# Altium footprint library sarmixer.PcbLib: 15 footprints
Each footprint in its own frame and in the unit in brackets; x right, y up, seen from the top. Pads: shape width x height; smd on the part's side, far side on the other; paste and mask are expansions set on the pad; w line width, h text height; cw(c..) or ccw(c..) is an arc to the next point about the centre after c.
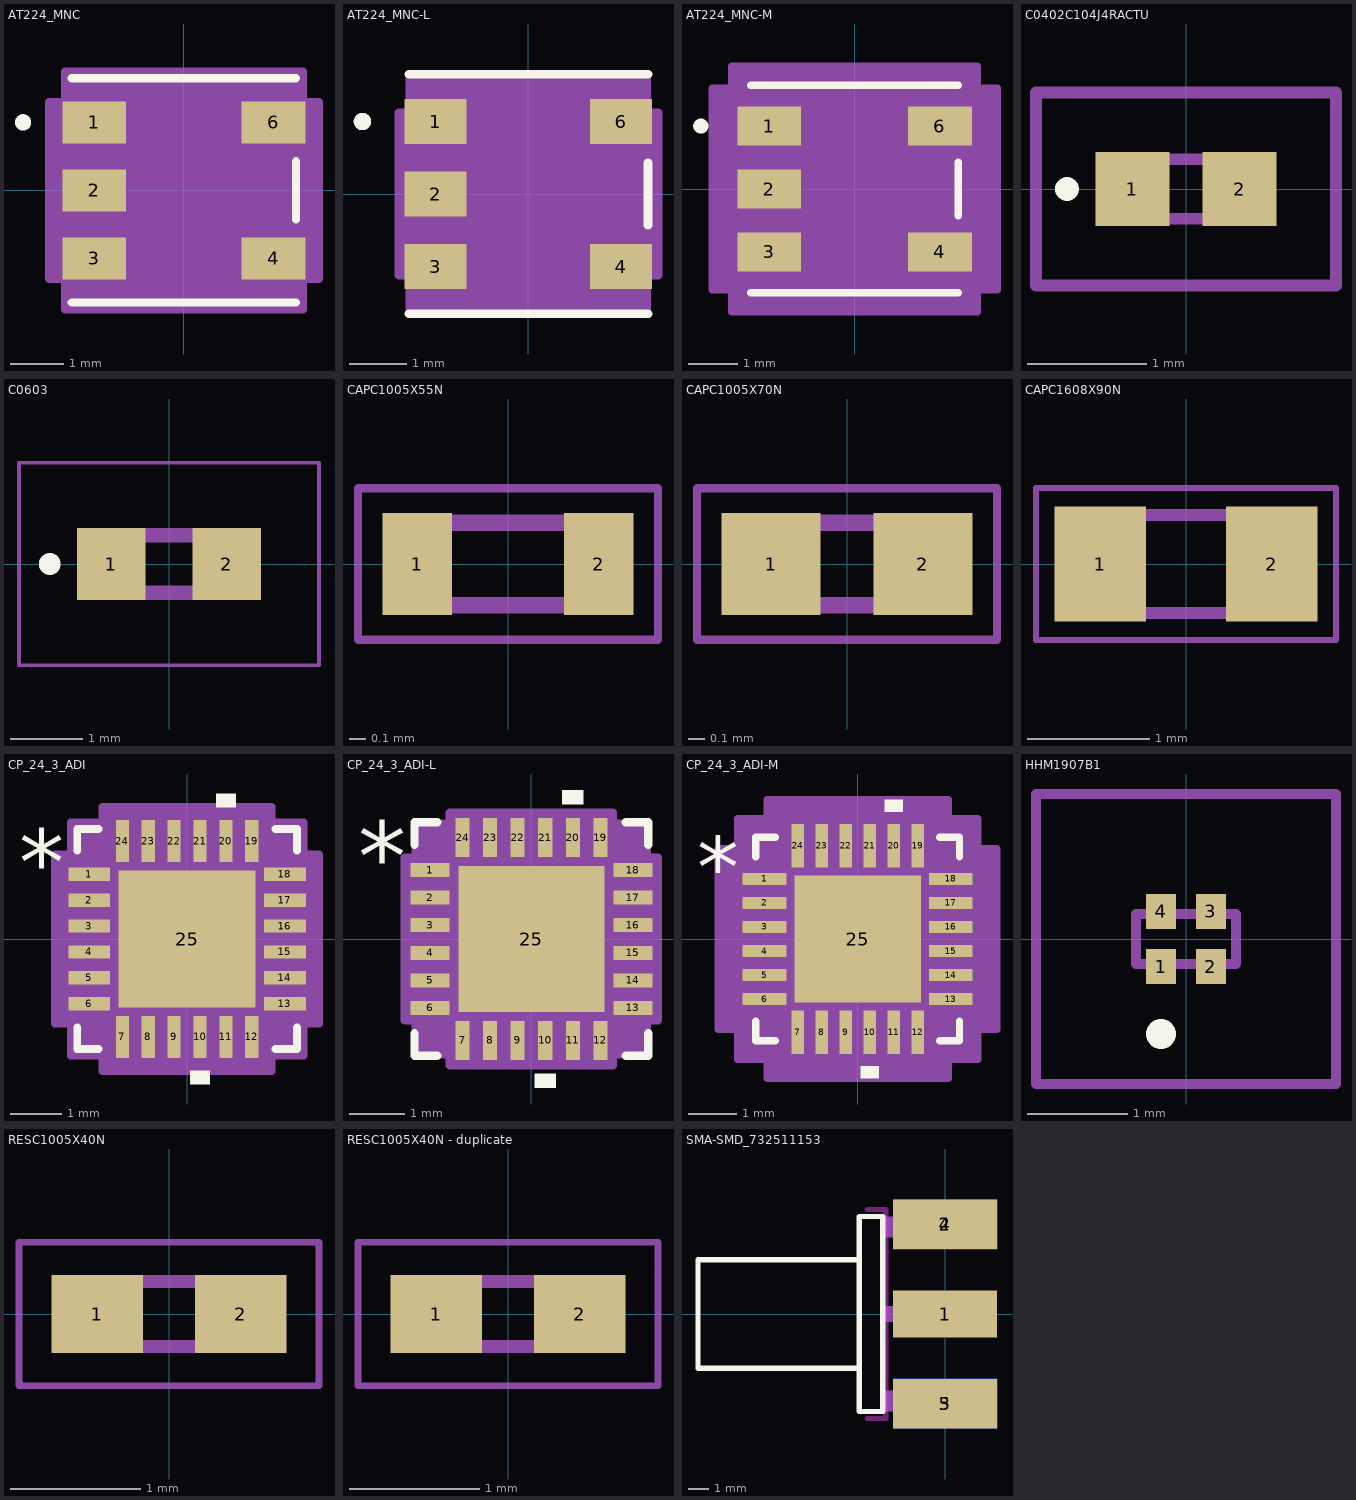
[diagram p0: the footprints below, top view; thin cyan lines are the x and y axes]

## AT224_MNC [mm]
pads (5):
  rect 1.189x0.788 smd paste+0 mask+0: 1(-1.674,1.27) 2(-1.674,0) 3(-1.674,-1.27) 4(1.674,-1.27) 6(1.674,1.27)
Top Overlay:
  circle w0.152: c-3.005,1.27 r0.076
  lines w0.152: -2.095,-2.095 2.095,-2.095 ; -2.095,2.095 2.095,2.095 ; 2.095,-0.543 2.095,0.543
  text ".Designator" at -3.492,-0.635 h1.27
Mechanical 13:
  circle w0.025: c-1.079,1.27 r0.076
  lines w0.025: -0.305,1.968 ccw(c0,1.968) 0.305,1.968 ; -1.968,-1.968 1.968,-1.968 1.968,1.968 -1.968,1.968 -1.968,-1.968
  text ".Designator" at -3.492,-0.635 h1.27
Mechanical 15:
  region: 2.222,-2.222 -2.222,-2.222 -2.222,-1.651 -2.522,-1.651 -2.522,1.651 -2.222,1.651 -2.222,2.222 2.222,2.222 2.222,1.651 2.522,1.651 2.522,-1.651 2.222,-1.651
  lines w0.152: -2.522,-1.651 -2.222,-1.651 -2.222,-2.222 2.222,-2.222 2.222,-1.651 2.522,-1.651 2.522,1.651 2.222,1.651 2.222,2.222 -2.222,2.222 -2.222,1.651 -2.522,1.651 -2.522,-1.651
3D body "AT224_MNC.step": height 3.81, standoff 0, extent -1.968,-1.968 1.968,1.968

## AT224_MNC-L [mm]
pads (5):
  rect 1.089x0.788 smd paste+0 mask+0: 1(-1.624,1.27) 2(-1.624,0) 3(-1.624,-1.27) 4(1.624,-1.27) 6(1.624,1.27)
Top Overlay:
  circle w0.152: c-2.905,1.27 r0.076
  lines w0.152: -2.095,-2.095 2.095,-2.095 ; -2.095,2.095 2.095,2.095 ; 2.095,-0.543 2.095,0.543
  text ".Designator" at -3.492,-0.635 h1.27
Mechanical 13:
  circle w0.025: c-1.079,1.27 r0.076
  lines w0.025: -0.305,1.968 ccw(c0,1.968) 0.305,1.968 ; -1.968,-1.968 1.968,-1.968 1.968,1.968 -1.968,1.968 -1.968,-1.968
  text ".Designator" at -3.492,-0.635 h1.27
Mechanical 15:
  region: 2.07,-2.07 -2.07,-2.07 -2.07,-1.422 -2.27,-1.422 -2.27,1.422 -2.07,1.422 -2.07,2.07 2.07,2.07 2.07,1.422 2.27,1.422 2.27,-1.422 2.07,-1.422
  lines w0.152: -2.27,-1.422 -2.07,-1.422 -2.07,-2.07 2.07,-2.07 2.07,-1.422 2.27,-1.422 2.27,1.422 2.07,1.422 2.07,2.07 -2.07,2.07 -2.07,1.422 -2.27,1.422 -2.27,-1.422
3D body "AT224_MNC.step": height 3.81, standoff 0, extent -1.968,-1.968 1.968,1.968

## AT224_MNC-M [mm]
pads (5):
  rect 1.289x0.788 smd paste+0 mask+0: 1(-1.724,1.27) 2(-1.724,0) 3(-1.724,-1.27) 4(1.724,-1.27) 6(1.724,1.27)
Top Overlay:
  circle w0.152: c-3.105,1.27 r0.076
  lines w0.152: -2.095,-2.095 2.095,-2.095 ; -2.095,2.095 2.095,2.095 ; 2.095,-0.543 2.095,0.543
  text ".Designator" at -3.492,-0.635 h1.27
Mechanical 13:
  circle w0.025: c-1.079,1.27 r0.076
  lines w0.025: -0.305,1.968 ccw(c0,1.968) 0.305,1.968 ; -1.968,-1.968 -1.968,1.968 1.968,1.968 1.968,-1.968 -1.968,-1.968
  text ".Designator" at -3.492,-0.635 h1.27
Mechanical 15:
  region: 2.476,-2.476 -2.476,-2.476 -2.476,-2.032 -2.876,-2.032 -2.876,2.032 -2.476,2.032 -2.476,2.476 2.476,2.476 2.476,2.032 2.876,2.032 2.876,-2.032 2.476,-2.032
  lines w0.152: -2.876,-2.032 -2.876,2.032 -2.476,2.032 -2.476,2.476 2.476,2.476 2.476,2.032 2.876,2.032 2.876,-2.032 2.476,-2.032 2.476,-2.476 -2.476,-2.476 -2.476,-2.032 -2.876,-2.032
3D body "AT224_MNC.step": height 3.81, standoff 0, extent -1.968,-1.968 1.968,1.968

## C0402C104J4RACTU [mm]
pads (2):
  rect 0.62x0.62 smd: 1(-0.45,0) 2(0.45,0)
Top Overlay:
  lines w0.1: -1,-0.05 ccw(c-1,0) -1,0.05 ccw(c-1,0) -1,-0.05
Mechanical 13:
  lines w0.1: -0.5,-0.25 -0.5,0.25 0.5,0.25 0.5,-0.25 -0.5,-0.25
Mechanical 15:
  lines w0.1: -1.26,-0.81 -1.26,0.81 1.26,0.81 1.26,-0.81 -1.26,-0.81
3D body "C0402C104K4RACTU.stp": height 0.55, standoff 0, extent -0.52,-0.28 0.53,0.27

## C0603 [mm]
pads (2):
  rect 0.95x1 smd: 1(-0.8,0) 2(0.8,0)
Top Overlay:
  circle w0.2: c-1.65,0 r0.05
Mechanical 13:
  lines w0.2: -0.8,-0.4 0.8,-0.4 0.8,0.4 -0.8,0.4 -0.8,-0.4
Mechanical 15:
  lines w0.05: -2.075,-1.4 2.075,-1.4 2.075,1.4 -2.075,1.4 -2.075,-1.4
3D body "C0603C104K4RACAUTO.stp": height 0.87, standoff 0, extent -0.87,-0.48 0.88,0.47

## CAPC1005X55N [mm]
pads (2):
  rect 0.42x0.62 smd: 1(-0.55,0) 2(0.55,0)
Mechanical 13:
  lines w0.1: -0.5,-0.25 0.5,-0.25 0.5,0.25 -0.5,0.25 -0.5,-0.25
Mechanical 15:
  lines w0.05: -0.91,-0.46 0.91,-0.46 0.91,0.46 -0.91,0.46 -0.91,-0.46
3D body "CGA2B2X8R2A222K050BA.stp": height 0.55, standoff 0, extent -0.5,-0.25 0.5,0.25

## CAPC1005X70N [mm]
pads (2):
  rect 0.6x0.62 smd: 1(-0.46,0) 2(0.46,0)
Mechanical 13:
  lines w0.1: -0.5,-0.25 0.5,-0.25 0.5,0.25 -0.5,0.25 -0.5,-0.25
Mechanical 15:
  lines w0.05: -0.91,-0.46 0.91,-0.46 0.91,0.46 -0.91,0.46 -0.91,-0.46
3D body "GRM1555C1H102JA01J.stp": height 0.5, standoff 0, extent -0.5,-0.25 0.5,0.25

## CAPC1608X90N [mm]
pads (2):
  rect 0.75x0.94 smd: 1(-0.7,0) 2(0.7,0)
Mechanical 13:
  lines w0.1: -0.8,-0.4 0.8,-0.4 0.8,0.4 -0.8,0.4 -0.8,-0.4
Mechanical 15:
  lines w0.05: -1.225,-0.62 1.225,-0.62 1.225,0.62 -1.225,0.62 -1.225,-0.62
3D body "GRM188D71A225KE34J.stp": height 0.8, standoff 0, extent -0.8,-0.45 0.8,0.45

## CP_24_3_ADI [mm]
pads (25):
  rect 0.808x0.255 smd paste+0 mask+0: 1(-1.89,1.25) 2(-1.89,0.75) 3(-1.89,0.25) 4(-1.89,-0.25) 5(-1.89,-0.75) 6(-1.89,-1.25) 13(1.89,-1.25) 14(1.89,-0.75) 15(1.89,-0.25) 16(1.89,0.25) 17(1.89,0.75) 18(1.89,1.25)
  rect 0.255x0.808 smd paste+0 mask+0: 7(-1.25,-1.89) 8(-0.75,-1.89) 9(-0.25,-1.89) 10(0.25,-1.89) 11(0.75,-1.89) 12(1.25,-1.89) 19(1.25,1.89) 20(0.75,1.89) 21(0.25,1.89) 22(-0.25,1.89) 23(-0.75,1.89) 24(-1.25,1.89)
  rect 2.642x2.642 smd paste-1.321 mask+0: 25(0,0)
Top Overlay:
  region: 0.44,-2.548 0.059,-2.548 0.059,-2.802 0.44,-2.802
  region: 0.941,2.548 0.56,2.548 0.56,2.802 0.941,2.802
  lines w0.152: -2.121,-1.71 -2.121,-2.121 -1.71,-2.121 ; -2.121,1.71 -2.121,2.121 -1.71,2.121 ; 1.71,-2.121 2.121,-2.121 2.121,-1.71 ; 1.71,2.121 2.121,2.121 2.121,1.71
  text "*" at -3.246,0.865 h1.27
  text ".Designator" at -3.492,-0.635 h1.27
Top Paste:
  region: -0.1,1.221 -1.221,1.221 -1.221,0.1 -0.1,0.1
  region: -0.1,-0.1 -1.221,-0.1 -1.221,-1.221 -0.1,-1.221
  region: 1.221,1.221 0.1,1.221 0.1,0.1 1.221,0.1
  region: 1.221,-0.1 0.1,-0.1 0.1,-1.221 1.221,-1.221
Mechanical 13:
  lines w0.025: -1.994,0.724 -0.724,1.994 ; -1.994,-1.994 1.994,-1.994 1.994,1.994 -1.994,1.994 -1.994,-1.994 ; -1.994,-1.402 -1.994,-1.098 -1.994,-1.402 ; -1.994,-0.902 -1.994,-0.598 -1.994,-0.902 ; -1.994,-0.402 -1.994,-0.098 -1.994,-0.402 ; -1.994,0.098 -1.994,0.402 -1.994,0.098 ; -1.994,0.598 -1.994,0.902 -1.994,0.598 ; -1.994,1.098 -1.994,1.402 -1.994,1.098 ; -1.402,-1.994 -1.098,-1.994 -1.402,-1.994 ; -1.402,1.994 -1.098,1.994 -1.402,1.994 ; -0.902,-1.994 -0.598,-1.994 -0.902,-1.994 ; -0.902,1.994 -0.598,1.994 -0.902,1.994 ; -0.402,-1.994 -0.098,-1.994 -0.402,-1.994 ; -0.402,1.994 -0.098,1.994 -0.402,1.994 ; 0.098,-1.994 0.402,-1.994 0.098,-1.994 ; 0.098,1.994 0.402,1.994 0.098,1.994 ; 0.598,-1.994 0.902,-1.994 0.598,-1.994 ; 0.598,1.994 0.902,1.994 0.598,1.994 ; 1.098,-1.994 1.402,-1.994 1.098,-1.994 ; 1.098,1.994 1.402,1.994 1.098,1.994 ; 1.994,-1.402 1.994,-1.098 1.994,-1.402 ; 1.994,-0.902 1.994,-0.598 1.994,-0.902 ; 1.994,-0.402 1.994,-0.098 1.994,-0.402 ; 1.994,0.098 1.994,0.402 1.994,0.098 ; 1.994,0.598 1.994,0.902 1.994,0.598 ; 1.994,1.098 1.994,1.402 1.994,1.098
  text ".Designator" at -3.492,-0.635 h1.27
  text "*" at -1.803,0.865 h1.27
Mechanical 15:
  region: -1.631,-2.248 -2.248,-2.248 -2.248,-1.631 -2.548,-1.631 -2.548,1.631 -2.248,1.631 -2.248,2.248 -1.631,2.248 -1.631,2.548 1.631,2.548 1.631,2.248 2.248,2.248 2.248,1.631 2.548,1.631 2.548,-1.631 2.248,-1.631 2.248,-2.248 1.631,-2.248 1.631,-2.548 -1.631,-2.548
  lines w0.152: -2.548,-1.631 -2.248,-1.631 -2.248,-2.248 -1.631,-2.248 -1.631,-2.548 1.631,-2.548 1.631,-2.248 2.248,-2.248 2.248,-1.631 2.548,-1.631 2.548,1.631 2.248,1.631 2.248,2.248 1.631,2.248 1.631,2.548 -1.631,2.548 -1.631,2.248 -2.248,2.248 -2.248,1.631 -2.548,1.631 -2.548,-1.631
3D body "CP_24_3_ADI.step": height 0.99, standoff 0, extent -1.994,-1.994 1.994,1.994

## CP_24_3_ADI-L [mm]
pads (25):
  rect 0.708x0.255 smd paste+0 mask+0: 1(-1.84,1.25) 2(-1.84,0.75) 3(-1.84,0.25) 4(-1.84,-0.25) 5(-1.84,-0.75) 6(-1.84,-1.25) 13(1.84,-1.25) 14(1.84,-0.75) 15(1.84,-0.25) 16(1.84,0.25) 17(1.84,0.75) 18(1.84,1.25)
  rect 0.255x0.708 smd paste+0 mask+0: 7(-1.25,-1.84) 8(-0.75,-1.84) 9(-0.25,-1.84) 10(0.25,-1.84) 11(0.75,-1.84) 12(1.25,-1.84) 19(1.25,1.84) 20(0.75,1.84) 21(0.25,1.84) 22(-0.25,1.84) 23(-0.75,1.84) 24(-1.25,1.84)
  rect 2.642x2.642 smd paste-1.321 mask+0: 25(0,0)
Top Overlay:
  region: 0.941,2.448 0.56,2.448 0.56,2.702 0.941,2.702
  region: 0.44,-2.448 0.059,-2.448 0.059,-2.702 0.44,-2.702
  lines w0.152: -2.121,-1.71 -2.121,-2.121 -1.71,-2.121 ; -2.121,1.71 -2.121,2.121 -1.71,2.121 ; 1.71,-2.121 2.121,-2.121 2.121,-1.71 ; 1.71,2.121 2.121,2.121 2.121,1.71
  text ".Designator" at -3.492,-0.635 h1.27
  text "*" at -3.146,0.865 h1.27
Top Paste:
  region: 1.221,-0.1 0.1,-0.1 0.1,-1.221 1.221,-1.221
  region: 1.221,1.221 0.1,1.221 0.1,0.1 1.221,0.1
  region: -0.1,-0.1 -1.221,-0.1 -1.221,-1.221 -0.1,-1.221
  region: -0.1,1.221 -1.221,1.221 -1.221,0.1 -0.1,0.1
Mechanical 13:
  lines w0.025: -1.994,0.724 -0.724,1.994 ; -1.994,-1.994 -1.994,1.994 1.994,1.994 1.994,-1.994 -1.994,-1.994 ; -1.994,-1.402 -1.994,-1.098 -1.994,-1.402 ; -1.994,-0.902 -1.994,-0.598 -1.994,-0.902 ; -1.994,-0.402 -1.994,-0.098 -1.994,-0.402 ; -1.994,0.098 -1.994,0.402 -1.994,0.098 ; -1.994,0.598 -1.994,0.902 -1.994,0.598 ; -1.994,1.098 -1.994,1.402 -1.994,1.098 ; -1.402,-1.994 -1.098,-1.994 -1.402,-1.994 ; -1.402,1.994 -1.098,1.994 -1.402,1.994 ; -0.902,-1.994 -0.598,-1.994 -0.902,-1.994 ; -0.902,1.994 -0.598,1.994 -0.902,1.994 ; -0.402,-1.994 -0.098,-1.994 -0.402,-1.994 ; -0.402,1.994 -0.098,1.994 -0.402,1.994 ; 0.098,-1.994 0.402,-1.994 0.098,-1.994 ; 0.098,1.994 0.402,1.994 0.098,1.994 ; 0.598,-1.994 0.902,-1.994 0.598,-1.994 ; 0.598,1.994 0.902,1.994 0.598,1.994 ; 1.098,-1.994 1.402,-1.994 1.098,-1.994 ; 1.098,1.994 1.402,1.994 1.098,1.994 ; 1.994,-1.402 1.994,-1.098 1.994,-1.402 ; 1.994,-0.902 1.994,-0.598 1.994,-0.902 ; 1.994,-0.402 1.994,-0.098 1.994,-0.402 ; 1.994,0.098 1.994,0.402 1.994,0.098 ; 1.994,0.598 1.994,0.902 1.994,0.598 ; 1.994,1.098 1.994,1.402 1.994,1.098
  text "*" at -1.803,0.865 h1.27
  text ".Designator" at -3.492,-0.635 h1.27
Mechanical 15:
  region: -1.479,-2.095 -2.095,-2.095 -2.095,-1.479 -2.295,-1.479 -2.295,1.479 -2.095,1.479 -2.095,2.095 -1.479,2.095 -1.479,2.295 1.479,2.295 1.479,2.095 2.095,2.095 2.095,1.479 2.295,1.479 2.295,-1.479 2.095,-1.479 2.095,-2.095 1.479,-2.095 1.479,-2.295 -1.479,-2.295
  lines w0.152: -2.295,-1.479 -2.295,1.479 -2.095,1.479 -2.095,2.095 -1.479,2.095 -1.479,2.295 1.479,2.295 1.479,2.095 2.095,2.095 2.095,1.479 2.295,1.479 2.295,-1.479 2.095,-1.479 2.095,-2.095 1.479,-2.095 1.479,-2.295 -1.479,-2.295 -1.479,-2.095 -2.095,-2.095 -2.095,-1.479 -2.295,-1.479
3D body "CP_24_3_ADI.step": height 0.99, standoff 0, extent -1.994,-1.994 1.994,1.994

## CP_24_3_ADI-M [mm]
pads (25):
  rect 0.908x0.255 smd paste+0 mask+0: 1(-1.94,1.25) 2(-1.94,0.75) 3(-1.94,0.25) 4(-1.94,-0.25) 5(-1.94,-0.75) 6(-1.94,-1.25) 13(1.94,-1.25) 14(1.94,-0.75) 15(1.94,-0.25) 16(1.94,0.25) 17(1.94,0.75) 18(1.94,1.25)
  rect 0.255x0.908 smd paste+0 mask+0: 7(-1.25,-1.94) 8(-0.75,-1.94) 9(-0.25,-1.94) 10(0.25,-1.94) 11(0.75,-1.94) 12(1.25,-1.94) 19(1.25,1.94) 20(0.75,1.94) 21(0.25,1.94) 22(-0.25,1.94) 23(-0.75,1.94) 24(-1.25,1.94)
  rect 2.642x2.642 smd paste-1.321 mask+0: 25(0,0)
Top Overlay:
  region: 0.44,-2.648 0.059,-2.648 0.059,-2.902 0.44,-2.902
  region: 0.941,2.648 0.56,2.648 0.56,2.902 0.941,2.902
  lines w0.152: -2.121,-1.71 -2.121,-2.121 -1.71,-2.121 ; -2.121,1.71 -2.121,2.121 -1.71,2.121 ; 1.71,-2.121 2.121,-2.121 2.121,-1.71 ; 1.71,2.121 2.121,2.121 2.121,1.71
  text "*" at -3.346,0.865 h1.27
  text ".Designator" at -3.492,-0.635 h1.27
Top Paste:
  region: -0.1,1.221 -1.221,1.221 -1.221,0.1 -0.1,0.1
  region: -0.1,-0.1 -1.221,-0.1 -1.221,-1.221 -0.1,-1.221
  region: 1.221,1.221 0.1,1.221 0.1,0.1 1.221,0.1
  region: 1.221,-0.1 0.1,-0.1 0.1,-1.221 1.221,-1.221
Mechanical 13:
  lines w0.025: -1.994,0.724 -0.724,1.994 ; -1.994,-1.994 1.994,-1.994 1.994,1.994 -1.994,1.994 -1.994,-1.994 ; -1.994,-1.402 -1.994,-1.098 -1.994,-1.402 ; -1.994,-0.902 -1.994,-0.598 -1.994,-0.902 ; -1.994,-0.402 -1.994,-0.098 -1.994,-0.402 ; -1.994,0.098 -1.994,0.402 -1.994,0.098 ; -1.994,0.598 -1.994,0.902 -1.994,0.598 ; -1.994,1.098 -1.994,1.402 -1.994,1.098 ; -1.402,-1.994 -1.098,-1.994 -1.402,-1.994 ; -1.402,1.994 -1.098,1.994 -1.402,1.994 ; -0.902,-1.994 -0.598,-1.994 -0.902,-1.994 ; -0.902,1.994 -0.598,1.994 -0.902,1.994 ; -0.402,-1.994 -0.098,-1.994 -0.402,-1.994 ; -0.402,1.994 -0.098,1.994 -0.402,1.994 ; 0.098,-1.994 0.402,-1.994 0.098,-1.994 ; 0.098,1.994 0.402,1.994 0.098,1.994 ; 0.598,-1.994 0.902,-1.994 0.598,-1.994 ; 0.598,1.994 0.902,1.994 0.598,1.994 ; 1.098,-1.994 1.402,-1.994 1.098,-1.994 ; 1.098,1.994 1.402,1.994 1.098,1.994 ; 1.994,-1.402 1.994,-1.098 1.994,-1.402 ; 1.994,-0.902 1.994,-0.598 1.994,-0.902 ; 1.994,-0.402 1.994,-0.098 1.994,-0.402 ; 1.994,0.098 1.994,0.402 1.994,0.098 ; 1.994,0.598 1.994,0.902 1.994,0.598 ; 1.994,1.098 1.994,1.402 1.994,1.098
  text ".Designator" at -3.492,-0.635 h1.27
  text "*" at -1.803,0.865 h1.27
Mechanical 15:
  region: -1.885,-2.502 -2.502,-2.502 -2.502,-1.885 -2.902,-1.885 -2.902,1.885 -2.502,1.885 -2.502,2.502 -1.885,2.502 -1.885,2.902 1.885,2.902 1.885,2.502 2.502,2.502 2.502,1.885 2.902,1.885 2.902,-1.885 2.502,-1.885 2.502,-2.502 1.885,-2.502 1.885,-2.902 -1.885,-2.902
  lines w0.152: -2.902,-1.885 -2.502,-1.885 -2.502,-2.502 -1.885,-2.502 -1.885,-2.902 1.885,-2.902 1.885,-2.502 2.502,-2.502 2.502,-1.885 2.902,-1.885 2.902,1.885 2.502,1.885 2.502,2.502 1.885,2.502 1.885,2.902 -1.885,2.902 -1.885,2.502 -2.502,2.502 -2.502,1.885 -2.902,1.885 -2.902,-1.885
3D body "CP_24_3_ADI.step": height 0.99, standoff 0, extent -1.994,-1.994 1.994,1.994

## HHM1907B1 [mm]
pads (4):
  rect 0.3x0.35 smd: 1(-0.25,-0.275) 2(0.25,-0.275) 3(0.25,0.275) 4(-0.25,0.275)
Top Overlay:
  lines w0.2: -0.25,-1 cw(c-0.25,-0.95) -0.25,-0.9 ; -0.25,-1 ccw(c-0.25,-0.95) -0.25,-0.9 ; -0.25,-1 cw(c-0.25,-0.95) -0.25,-0.9
Mechanical 13:
  lines w0.1: -0.5,-0.25 -0.5,0.25 0.5,0.25 0.5,-0.25 -0.5,-0.25
Mechanical 15:
  lines w0.1: -1.5,-1.45 -1.5,1.45 1.5,1.45 1.5,-1.45 -1.5,-1.45
3D body "HHM1907B1.stp": height 0.6, standoff 0, extent -0.5,-0.42 0.5,0.42

## RESC1005X40N [mm]
pads (2):
  rect 0.7x0.6 smd: 1(-0.55,0) 2(0.55,0)
Mechanical 13:
  lines w0.1: -0.5,-0.25 0.5,-0.25 0.5,0.25 -0.5,0.25 -0.5,-0.25
Mechanical 15:
  lines w0.05: -1.15,-0.55 1.15,-0.55 1.15,0.55 -1.15,0.55 -1.15,-0.55
3D body "CRCW04021K62FKEDHP.stp": height 0.4, standoff 0, extent -0.5,-0.25 0.5,0.25

## RESC1005X40N - duplicate [mm]
pads (2):
  rect 0.7x0.6 smd: 1(-0.55,0) 2(0.55,0)
Mechanical 13:
  lines w0.1: -0.5,-0.25 0.5,-0.25 0.5,0.25 -0.5,0.25 -0.5,-0.25
Mechanical 15:
  lines w0.05: -1.15,-0.55 1.15,-0.55 1.15,0.55 -1.15,0.55 -1.15,-0.55
3D body "CRCW04021K62FKEDHP.stp": height 0.4, standoff 0, extent -0.5,-0.25 0.5,0.25

## SMA-SMD_732511153 [mm]
pads (5):
  rect 5.08x2.29 smd: 1(0,0)
  rect 5.08x2.42 smd: 2(0,4.38) 3(0,-4.38)
  rect 5.08x2.42 smd far side: 4(0,4.38) 5(0,-4.38)
Top Overlay:
  lines w0.254: -4.19,-4.76 -3.04,-4.76 -3.04,4.76 -4.19,4.76 -4.19,-4.75 ; -4.19,-2.65 -12.07,-2.65 -12.07,2.651 -4.19,2.651
Keep-Out Layer:
  lines w0.254: -3.8,-5.1 -2.9,-5.1 -2.9,5.1 -3.8,5.1
Mechanical 2:
  region: -4.19,-2.7 -12.07,-2.7 -12.095,-2.693 -12.113,-2.675 -12.12,-2.65 -12.12,2.65 -12.113,2.675 -12.095,2.693 -12.07,2.7 -4.19,2.7 -4.161,2.69 -4.142,2.665 -4.142,2.635 -4.161,2.609 -4.19,2.6 -12.02,2.6 -12.02,-2.6 -4.19,-2.6 -4.161,-2.609 -4.142,-2.635 -4.142,-2.665 -4.161,-2.69 -4.19,-2.7
Mechanical 6:
  lines w0.051: -12.07,-2.65 -12.07,2.65 -4.19,2.65 -4.19,4.76 -3.04,4.76 -3.04,3.75 -3.04,-4.76 -4.19,-4.76 -4.19,-2.65 -12.07,-2.65
Mechanical 8:
  region: 2.27,4.76 2.27,4.735 2.235,4.7 2.185,4.7 2.15,4.735 2.15,4.76 2.15,4.785 2.185,4.82 2.235,4.82 2.27,4.785 2.27,4.76
Mechanical 9:
  region: 2.21,4.76 2.21,3.75 -3.09,3.75 -3.09,4.76
  region: -3.09,-4.76 -3.09,-3.75 2.21,-3.75 2.21,-4.76
  region: 2.21,0.38 2.21,-0.38 -3.1,-0.38 -3.1,0.38
  region: -3.09,-4.76 -3.09,-3.75 2.21,-3.75 2.21,-4.76
  region: 2.21,4.76 2.21,3.75 -3.09,3.75 -3.09,4.76
3D body "732511153.stp": height 3.96, standoff -3.96, extent -12.065,-4.763 2.21,4.763